# Altium schematic symbol library TSM-104-01-L-SV.SchLib: 1 symbol
Pins are listed as number, name and electrical type; pins without a type are passive.

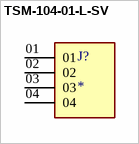
[diagram p0: symbol TSM-104-01-L-SV]

## TSM-104-01-L-SV
designator J?
MF: Samtec; MP: TSM-104-01-L-SV; Value: *; Package: None; Price: None; Availability: Unavailable
footprint SAMTEC_TSM-104-01-L-SV
pins: 01, 02, 03, 04